# Altium schematic symbol library 2mmHole.SchLib: 1 symbol
Pins are listed as number, name and electrical type; pins without a type are passive.

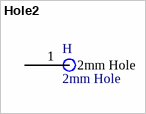
[diagram p0: symbol Hole2]

## Hole2
designator H, comment 2mm Hole
footprint 2mmHole
pins: 1 2mm Hole